# Altium integrated library SFH617A-3X017T.IntLib: 1 symbol
Pins are listed as number, name and electrical type; pins without a type are passive.

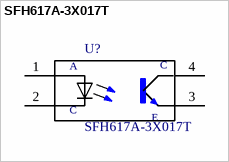
[diagram p0: symbol SFH617A-3X017T]

## SFH617A-3X017T
designator U?
MANUFACTURER: VISHAY; SOURCE_URL: https://www.snapeda.com/parts/SFH617A-3X017/Vishay/view-part/?ref=snap; Value: *
footprint *SOIC254P1016X360-4N
pins: 1 A, 2 C, 3 E, 4 CO